# Altium schematic symbol library crabit.SCHLIB: 16 symbols
Pins are listed as number, name and electrical type; pins without a type are passive.

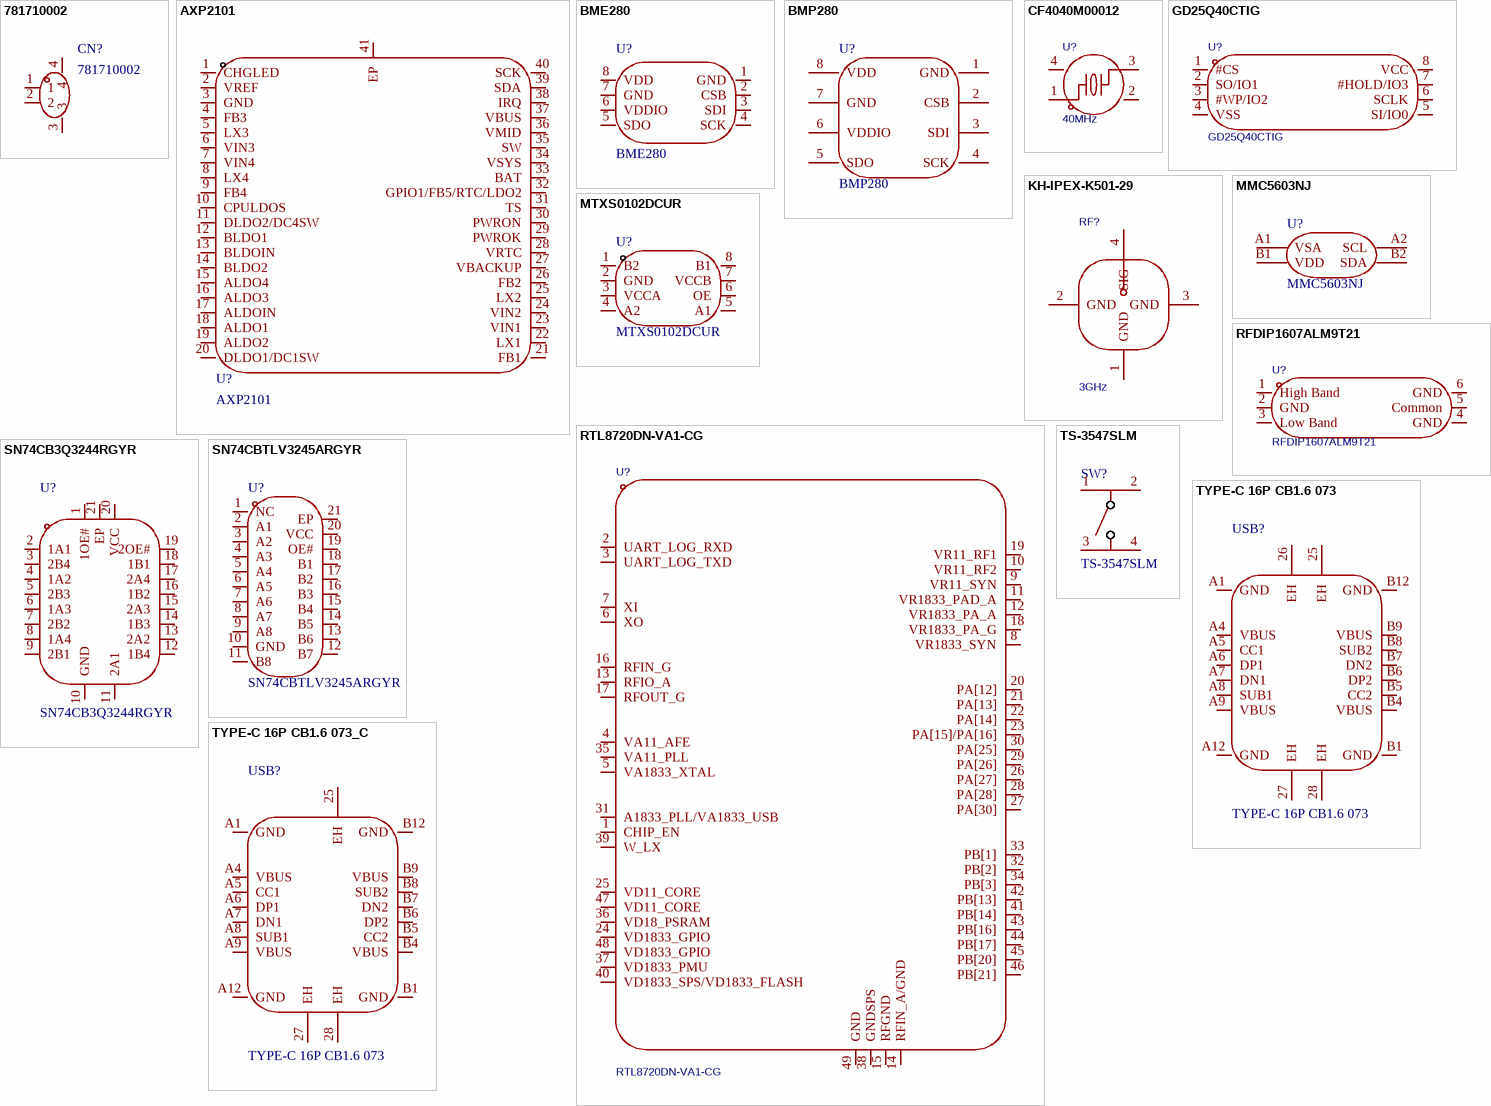
[diagram p0: symbols 781710002 to TYPE-C 16P CB1.6 073_C]

## 781710002
designator CN?
Manufacturer: MOLEX; Add into BOM: yes; Pins Structure: 1x2P; Pitch: 1.2mm; Number of PINs Per Row: 2; Current Rating: 1.5A; Voltage Rating: 50V; Flame Retardant Rating: UL94V-0; Symbol: 781710002; Device: 781710002; LCSC Part Name: 1x2P 间距:1.2mm 卧贴; Supplier Part: C505023; Manufacturer Part: 781710002; Supplier Footprint: SMD,P=1.2mm,卧贴; JLCPCB Part Class: 扩展库; Datasheet: https://www.molex.com/content/dam/molex/molex-dot-com/products/automated/en-us/salesdrawingpdf/781/78171/781710002_sd.pdf?inline; Supplier: LCSC; Convert to PCB: yes; Mounting Type: 卧贴; Reference Series: -; Number of Pins: 2P; Number of Rows: 1; Row Spacing: -; Contact Material: 铜合金; Contact Plating: 金; Operating Temperature: -40℃~+105℃; Color: 黑色
footprint CONN-SMD_2P-P1.20_781710002
3D model CONN-SMD_2P-P1.20_781710002
pins: 1, 2, 3, 4

## AXP2101
designator U?
Manufacturer: x-powers; Add into BOM: yes; Symbol: AXP2101; Device: AXP2101; LCSC Part Name: MINI-FIT 系列 TPA 2.0 端子 / 连接器; Supplier Part: C3036461; Manufacturer Part: AXP2101; Supplier Footprint: QFN-40-EP(5x5); JLCPCB Part Class: 扩展库; Datasheet: https://item.szlcsc.com/datasheet/AXP2101/3587325.html; Supplier: LCSC; Convert to PCB: yes
footprint QFN-40_L5.0-W5.0-P0.40-TL-EP3.4
3D model QFN-40_L5.0-W5.0-H0.9-P0.4-TL-EP
pins: 1 CHGLED, 2 VREF, 3 GND, 4 FB3, 5 LX3, 6 VIN3, 7 VIN4, 8 LX4, 9 FB4, 10 CPULDOS, 11 DLDO2/DC4SW, 12 BLDO1, 13 BLDOIN, 14 BLDO2, 15 ALDO4, 16 ALDO3, 17 ALDOIN, 18 ALDO1, 19 ALDO2, 20 DLDO1/DC1SW, 21 FB1, 22 LX1, 23 VIN1, 24 VIN2, 25 LX2, 26 FB2, 27 VBACKUP, 28 VRTC, 29 PWROK, 30 PWRON, 31 TS, 32 GPIO1/FB5/RTC/LDO2, 33 BAT, 34 VSYS, 35 SW, 36 VMID, 37 VBUS, 38 IRQ, 39 SDA, 40 SCK, 41 EP

## BME280
designator U?
Manufacturer: Bosch(博世); Add into BOM: yes; Humidity: 0%RH~100%RH; Interface: I2C；SPI; Voltage - Supply: 1.71V~3.6V; Current - Supply: 1.8uA; Humidity Tolerance: ±3%RH; Temperature Tolerance: ±0.5℃; Resolution: 16bit; Symbol: BME280; Device: BME280; LCSC Part Name: 湿度：0%RH~100%RH; Supplier Part: C92489; Manufacturer Part: BME280; Supplier Footprint: LGA-8(2.5x2.5); JLCPCB Part Class: 扩展库; Datasheet: https://item.szlcsc.com/datasheet/BME280/93682.html; Supplier: LCSC; Convert to PCB: yes; Temperature Range: -40℃~+85℃
footprint LGA-8_BME280_BL
3D model LGA-8_L2.5-W2.5-H0.9-P0.65
pins: 1 GND, 2 CSB, 3 SDI, 4 SCK, 5 SDO, 6 VDDIO, 7 GND, 8 VDD

## BMP280
designator U?
Manufacturer: Bosch(博世); Add into BOM: yes; Pressure range: 30Kpa~1.1bar; Voltage - Supply: 1.71V~3.6V; Standby Current: 300nA; Interface: SPI；I2C; Absolute Accuracy: 1hpa; Relative Accuracy: 0.12hpa; Temperature Coefficient of Offset(TCO): 1.5pa/K; Symbol: BMP280; Device: BMP280; LCSC Part Name: BMP280 停产; Supplier Part: C83291; Manufacturer Part: BMP280; Supplier Footprint: LGA-8(2x2.5); JLCPCB Part Class: 扩展库; Datasheet: https://item.szlcsc.com/datasheet/BMP280/84455.html; Supplier: LCSC; Convert to PCB: yes; Module: -; Features: 待机模式；集成ADC与数字接口；片内温度输出；片内校准与非易失存储; Response time: -; Operating Temperature: -40℃~+85℃
footprint LGA-8_L2.5-W2.0-P0.65_AMP6127
3D model LGA-8_L2.5-W2.0-P0.65_AMP6127
pins: 1 GND, 2 CSB, 3 SDI, 4 SCK, 5 SDO, 6 VDDIO, 7 GND, 8 VDD

## CF4040M00012
designator U?, comment 40MHz
晶振类型:贴片晶振;频率:40MHz;常温频差:±10ppm;负载电容:12pF;频率稳定度:±20ppm;; Manufacturer: JWT(晶威特); Symbol: CF4040M00012; AddInBom: yes; ModelId: ff2dfd5650294453a14147960efe1838聨0819f05c4eef4c71ace90d822a990e87; ModelName: CRYSTAL-SMD_4P-L3.2-W2.5-BL; ModelTransform: 125.984,98.425,0,0,0,0,0,0,0; Normal temperature Frequency Tolerance: ±10ppm; Load Capacitance: 12pF; Frequency Stability: ±20ppm; Device: CF4040M00012; LCSC Part Name: 40MHz ±10ppm 12pF; SupplierPart: C5765977; ManufacturerPart: CF4040M00012; Supplier Footprint: SMD3225-4P; JLCPCB Part Class: Extended Part; Datasheet: https://item.szlcsc.com/datasheet/CF4040M00012/6692521.html; Supplier: LCSC; ConvertToPcb: yes; FootprintName: CRYSTAL-SMD_4P-L3.2-W2.5-BL; Type: 贴片晶振; Value: 40MHz
footprint CRYSTAL-SMD_4P-L3.2-W2.5-BL
pins: 1, 2 GND, 3, 4 GND

## GD25Q40CTIG
designator U?
接口类型:SPI;存储容量:4Mbit;时钟频率(fc):120MHz;; Manufacturer: GigaDevice(兆易创新); AddInBom: yes; ModelId: 75c24a7891ee4dd6bdac16a7163ff87e聨0819f05c4eef4c71ace90d822a990e87; ModelName: SOP-8_L4.9-W3.9-P1.27-LS6.0-BL-1; ModelTransform: 192.913,236.22,0,0,0,0,0,0,0; Interface: SPI; Memory Size: 4Mbit; Clock Frequency: 120MHz; Voltage - Supply: 2.7V~3.6V; Standby Supply Current: 5uA; Program / Erase Cycles: 100000次; Page Programming Time (Tpp): 600us; Block Erase Time(tBE): 150ms@(32KB); Data Retention - TDR (Year): 20年; Symbol: GD25Q40CTIG; Device: GD25Q40CTIG; LCSC Part Name: 3.3V统一扇区双路和四路串行闪存; SupplierPart: C79077; ManufacturerPart: GD25Q40CTIG; Supplier Footprint: SOP-8; JLCPCB Part Class: Extended Part; Datasheet: https://item.szlcsc.com/datasheet/GD25Q40CTIG/80214.html; Supplier: LCSC; ConvertToPcb: yes; FootprintName: SOP-8_L4.9-W3.9-P1.27-LS6.0-BL; Operating Temperature: -
footprint SOP-8_L4.9-W3.9-P1.27-LS6.0-BL
pins: 1 #CS, 2 SO/IO1, 3 #WP/IO2, 4 VSS, 5 SI/IO0, 6 SCLK, 7 #HOLD/IO3, 8 VCC

## KH-IPEX-K501-29
designator RF?, comment 3GHz
连接器类型:板端;接口类型:内针;端口数量:1;接口直径:2mm;接口长度/高度:1.25mm;频率:3GHz;射频系列:IPEX;阻抗:50Ω;样式:-;工作温度:-40℃~+90℃;; Manufacturer: kinghelm(金航标); Symbol: KH-IPEX-K501-29; AddInBom: yes; ModelId: 1390225c983f4fdcaa73eb43ca25e5d4聨0819f05c4eef4c71ace90d822a990e87; ModelName: ANT-SMD_KH-IPEX-K501-29; ModelTransform: 118.11,122.8344,0,0,0,0,0,0,0; Connector Type: 板端; Interface: 内针; Number of Ports: 1; Interface Diameter: 2mm; Interface Length/Height: 1.25mm; RF Series: IPEX; Impedance: 50Ω; Device: KH-IPEX-K501-29; LCSC Part Name: IPEX 内针; SupplierPart: C411563; ManufacturerPart: KH-IPEX-K501-29; Supplier Footprint: SMD; JLCPCB Part Class: Extended Part; Datasheet: https://item.szlcsc.com/datasheet/KH-IPEX-K501-29/402820.html; Supplier: LCSC; ConvertToPcb: yes; FootprintName: ANT-SMD_KH-IPEX-K501-29; Value: 3GHz; Style: -; Operating Temperature Range: -40℃~+90℃
footprint ANT-SMD_KH-IPEX-K501-29
pins: 1 GND, 2 GND, 3 GND, 4 SIG

## MMC5603NJ
designator U?
Manufacturer: MEMSIC(美新); Add into BOM: yes; Magnetic Sensing Range(X,Y): ±3mT; Output bit: 20bit; Interface Type: I2C; Voltage - Supply: 1.62V~3.6V; Current - Supply: 3.4mA；1.3mA；2.4mA；750uA; Symbol: MMC5603NJ; Device: MMC5603NJ; LCSC Part Name: 三轴磁传感器; Supplier Part: C404328; Manufacturer Part: MMC5603NJ; Supplier Footprint: WLP-4(0.8x0.8); JLCPCB Part Class: 扩展库; Datasheet: https://item.szlcsc.com/datasheet/MMC5603NJ/391847.html; Supplier: LCSC; Convert to PCB: yes; Magnetic Sensing Range(Z): ±3mT; Operating Temperature: -40℃~+85℃
footprint FLIPCHIP-4_L0.8-W0.8-R2-C2-P0.40-TL
3D model FLIPCHIP-4_L0.8-W0.8-R2-C2-P0.40-TL
pins: A1 VSA, A2 SCL, B1 VDD, B2 SDA

## MTXS0102DCUR
designator U?
Manufacturer: MSKSEMI(美森科); Add into BOM: yes; Symbol: MTXS0102DCUR; Device: MTXS0102DCUR; LCSC Part Name: MTXS0102DCUR; Supplier Part: C42403135; Manufacturer Part: MTXS0102DCUR; Supplier Footprint: VSSOP-8; JLCPCB Part Class: 扩展库; Datasheet: https://item.szlcsc.com/datasheet/MTXS0102DCUR/44365554.html; Supplier: LCSC; Convert to PCB: yes
footprint VSSOP-8_L2.1-W2.4-P0.50-LS3.2-BL
3D model VSSOP-8_L2.0-W2.3-H0.9-LS3.1-P0.50
pins: 1 B2, 2 GND, 3 VCCA, 4 A2, 5 A1, 6 OE, 7 VCCB, 8 B1

## RFDIP1607ALM9T21
designator U?
工作电压:-;元件数:-;触发沿:-;计数速率:-;; Manufacturer: Walsin(华新科); AddInBom: yes; ModelId: dfdfe6a65c7d48819bbe5549325001e2聨0819f05c4eef4c71ace90d822a990e87; ModelName: XFMR-SMD_6P-L1.6-W0.8-H0.6-P0.55-BL; ModelTransform: 62.992,31.496,0,0,0,0,0,0.005,0; Symbol: RFDIP1607ALM9T21; Device: RFDIP1607ALM9T21; LCSC Part Name: 分频器 FDD; SupplierPart: C2992319; ManufacturerPart: RFDIP1607ALM9T21; Supplier Footprint: SMD-6P,1.6x0.8mm; JLCPCB Part Class: Extended Part; Datasheet: https://item.szlcsc.com/datasheet/RFDIP1607ALM9T21/3456647.html; Supplier: LCSC; ConvertToPcb: yes; FootprintName: XFMR-SMD_6P-L1.6-W0.8-P0.55-BL; Logic Type: -; Direction: -; Voltage - Supply: -; Number of Elements: -; Trigger Type: -; Reset: -; Timing: -; Count Rate: -; Operating Temperature: -; Number of Bits per Element: -; Propagation Delay: -; Power Dissipation: -; Features: -
footprint XFMR-SMD_6P-L1.6-W0.8-P0.55-BL
pins: 1 High Band, 2 GND, 3 Low Band, 4 GND, 5 Common, 6 GND

## RTL8720DN-VA1-CG
designator U?
AddInBom: yes; ModelId: 75d8b471759e4c1a921823be2700eba1聨0819f05c4eef4c71ace90d822a990e87; ModelName: VQFN-48_L6.0-W6.0-P0.40-TL-EP4.7; ModelTransform: 237.007,237.007,0,0,0,0,0,0,0; Symbol: RTL8720DN-VA1-CG; Device: RTL8720DN-VA1-CG; LCSC Part Name: RTL8720DN-VA1-CG; SupplierPart: C9900165242; ManufacturerPart: RTL8720DN-VA1-CG; Supplier Footprint: QFN-48; Supplier: LCSC; ConvertToPcb: yes; FootprintName: VQFN-48_L6.0-W6.0-P0.40-TL-EP4.7
footprint VQFN-48_L6.0-W6.0-P0.40-TL-EP4.7
pins: 1 CHIP_EN, 2 UART_LOG_RXD, 3 UART_LOG_TXD, 4 VA11_AFE, 5 VA1833_XTAL, 6 XO, 7 XI, 8 VR1833_SYN, 9 VR11_SYN, 10 VR11_RF2, 11 VR1833_PAD_A, 12 VR1833_PA_A, 13 RFIO_A, 14 RFIN_A/GND, 15 RFGND, 16 RFIN_G, 17 RFOUT_G, 18 VR1833_PA_G, 19 VR11_RF1, 20 PA[12], 21 PA[13], 22 PA[14], 23 PA[15]/PA[16], 24 VD1833_GPIO, 25 VD11_CORE, 26 PA[27], 27 PA[30], 28 PA[28], 29 PA[26], 30 PA[25], 31 A1833_PLL/VA1833_USB, 32 PB[2], 33 PB[1], 34 PB[3], 35 VA11_PLL, 36 VD18_PSRAM, 37 VD1833_PMU, 38 GNDSPS, 39 W_LX, 40 VD1833_SPS/VD1833_FLASH, 41 PB[14], 42 PB[13], 43 PB[16], 44 PB[17], 45 PB[20], 46 PB[21], 47 VD11_CORE, 48 VD1833_GPIO, 49 GND

## SN74CB3Q3244RGYR
designator U?
Manufacturer: TI(德州仪器); Add into BOM: yes; Symbol: SN74CB3Q3244RGYR; Device: SN74CB3Q3244RGYR; LCSC Part Name: SN74CB3Q3244RGYR; Supplier Part: C201560; Manufacturer Part: SN74CB3Q3244RGYR; Supplier Footprint: VQFN-20-EP(3.7x4.7); JLCPCB Part Class: 扩展库; Datasheet: https://www.ti.com/cn/lit/gpn/sn74cb3q3244; Supplier: LCSC; Convert to PCB: yes
footprint VQFN-20_L4.7-W3.7-P0.50-BL-EP
3D model VQFN-20_L4.5-W3.5-H1.0-P0.50
pins: 1 1OE#, 2 1A1, 3 2B4, 4 1A2, 5 2B3, 6 1A3, 7 2B2, 8 1A4, 9 2B1, 10 GND, 11 2A1, 12 1B4, 13 2A2, 14 1B3, 15 2A3, 16 1B2, 17 2A4, 18 1B1, 19 2OE#, 20 VCC, 21 EP

## SN74CBTLV3245ARGYR
designator U?
Manufacturer: TI(德州仪器); Add into BOM: yes; Symbol: SN74CBTLV3245ARGYR; Device: SN74CBTLV3245ARGYR; LCSC Part Name: 低电压八进制FET总线开关，支持部分掉电模式; Supplier Part: C2674597; Manufacturer Part: SN74CBTLV3245ARGYR; Supplier Footprint: VQFN-20-EP(3.5x4.5); JLCPCB Part Class: 扩展库; Datasheet: https://www.ti.com/cn/lit/gpn/sn74cbtlv3245a; Supplier: LCSC; Convert to PCB: yes
footprint VQFN-20_L4.5-W3.5-P0.50-BL-EP-1
3D model VQFN-20_L4.5-W3.5-H1.0-P0.50
pins: 1 NC, 2 A1, 3 A2, 4 A3, 5 A4, 6 A5, 7 A6, 8 A7, 9 A8, 10 GND, 11 B8, 12 B7, 13 B6, 14 B5, 15 B4, 16 B3, 17 B2, 18 B1, 19 OE#, 20 VCC, 21 EP

## TS-3547SLM
designator SW?
Manufacturer: 康深; Add into BOM: yes; Circuit: 单刀单掷; Actuator Style: 矩形按钮; Operating Force: 2.5N; Switch Height: 1.6mm; with Bracket: 不带支架; Contact Current: 50mA; Voltage Rating: 12V; Actuator/Cap Color: 黑色; Symbol: TS-3547SLM; Device: TS-3547SLM; LCSC Part Name: 3.5*4.7mm 按键开关 贴膜中乌龟四脚 有定位  编带; Supplier Part: C47734524; Manufacturer Part: TS-3547SLM; Supplier Footprint: SMD; JLCPCB Part Class: 扩展库; Datasheet: https://item.szlcsc.com/datasheet/TS-3547SLM/49966945.html; Supplier: LCSC; Convert to PCB: yes; Mounting Type: 卧贴; Length: 6.2mm; Width: 4.4mm; With Lamp: -; Termination Style: SMD接片
footprint SW-SMD_TS-3547SLM
3D model SW-SMD_TS-3547SLM
pins: 1, 2, 3, 4

## TYPE-C 16P CB1.6 073
designator USB?
Manufacturer: SHOU HAN(首韩); Add into BOM: yes; Protocol Standard: USB 3.1; Gender: 母; Number of Ports: 1; Current Rating-Power: 3A; Voltage Rating: 5V; Connect-Disconnect Life: 5千次; Detection color: 黑色; Symbol: TYPE-C 16P CB1.6 073; Device: TYPE-C 16P CB1.6 073; LCSC Part Name: 16P卧贴母座; Supplier Part: C2906290; Manufacturer Part: TYPE-C 16P CB1.6 073; Supplier Footprint: SMD; JLCPCB Part Class: 扩展库; Datasheet: https://item.szlcsc.com/datasheet/TYPE-C%252016P%2520CB1.6%2520073/3179000.html; Supplier: LCSC; Convert to PCB: yes; Connector Type: Type-C; Mounting Type: 沉板; Number of Contacts: 16P; Operating Temperature: -25℃~+85℃
footprint USB-C-SMD_SHOU_TYPE-C-16P-CB1.6
3D model USB-C-SMD_SHOU_TYPE-C-16P-CB1.6
pins: 25 EH, 26 EH, 27 EH, 28 EH, A1 GND, A4 VBUS, A5 CC1, A6 DP1, A7 DN1, A8 SUB1, A9 VBUS, A12 GND, B1 GND, B4 VBUS, B5 CC2, B6 DP2, B7 DN2, B8 SUB2, B9 VBUS, B12 GND

## TYPE-C 16P CB1.6 073_C
designator USB?, comment TYPE-C 16P CB1.6 073
Manufacturer: SHOU HAN(首韩); Add into BOM: yes; Protocol Standard: USB 3.1; Gender: 母; Number of Ports: 1; Current Rating-Power: 3A; Voltage Rating: 5V; Connect-Disconnect Life: 5千次; Detection color: 黑色; Symbol: TYPE-C 16P CB1.6 073; Device: TYPE-C 16P CB1.6 073; LCSC Part Name: 16P卧贴母座; Supplier Part: C2906290; Manufacturer Part: TYPE-C 16P CB1.6 073; Supplier Footprint: SMD; JLCPCB Part Class: 扩展库; Datasheet: https://item.szlcsc.com/datasheet/TYPE-C%252016P%2520CB1.6%2520073/3179000.html; Supplier: LCSC; Convert to PCB: yes; Connector Type: Type-C; Mounting Type: 沉板; Number of Contacts: 16P; Operating Temperature: -25℃~+85℃
footprint USB-C-SMD_SHOU_TYPE-C-16P-CB1.6 -Crabit
3D model USB-C-SMD_SHOU_TYPE-C-16P-CB1.6
pins: 25 EH, 27 EH, 28 EH, A1 GND, A4 VBUS, A5 CC1, A6 DP1, A7 DN1, A8 SUB1, A9 VBUS, A12 GND, B1 GND, B4 VBUS, B5 CC2, B6 DP2, B7 DN2, B8 SUB2, B9 VBUS, B12 GND